# Altium footprint library 12DIP-LoRa-Wireless-Maodule.PcbLib: 2 footprints
Each footprint in its own frame and in the unit in brackets; x right, y up, seen from the top. Pads: shape width x height; smd on the part's side, far side on the other; paste and mask are expansions set on the pad; w line width, h text height; cw(c..) or ccw(c..) is an arc to the next point about the centre after c.
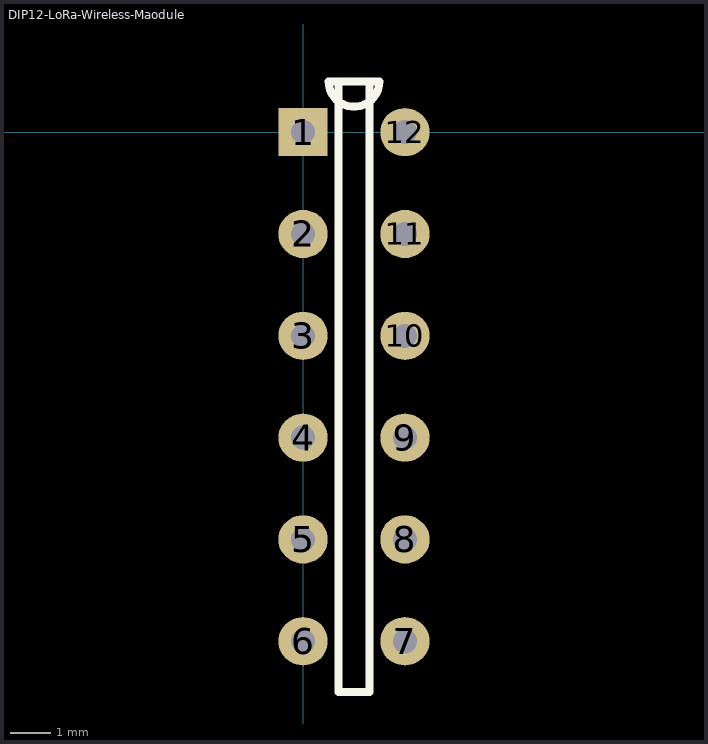
[diagram p0: the footprints below, top view; thin cyan lines are the x and y axes]

## DIP12-LoRa-Wireless-Maodule [mm]
pads (12):
  rect 1.23x1.2 hole 0.6: 1(0,0)
  oval 1.23x1.2 hole 0.6: 2(0,-2.54) 3(0,-5.08) 4(0,-7.62) 5(0,-10.16) 6(0,-12.7) 7(2.54,-12.7) 8(2.54,-10.16) 9(2.54,-7.62) 10(2.54,-5.08) 11(2.54,-2.54) 12(2.54,0)
Top Overlay:
  lines w0.2: 0.635,1.27 ccw(c1.27,1.27) 1.905,1.27 0.889,1.27 0.889,-2.974 0.889,-9.726 0.889,-13.97 1.651,-13.97 1.651,1.27 0.635,1.27

## PCBComponent_1 [mil]